# EAGLE library part IC_74HCT4067 (library dp_devices.v6)
74HCT4067 16-channel analog multiplexer/demultiplexer
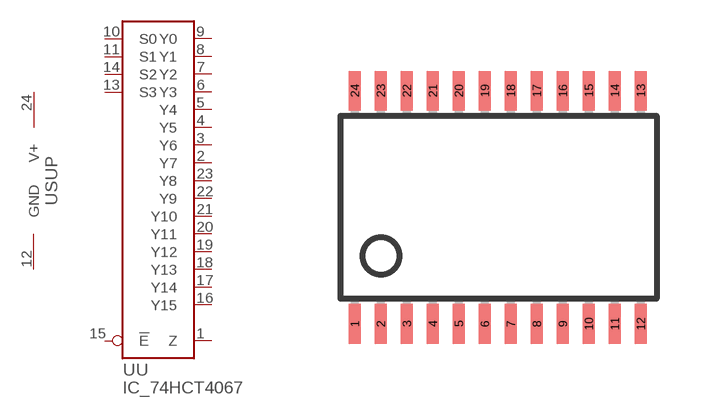
[diagram p179: symbol with the pads of TSSOP-24; footprint TSSOP-24]

Designator prefix U; gates U=74HCT4067 SUP=SUPPLY

## IC_74HCT4067  [TSSOP-24]
1  U:Z  in
2  U:Y7  in
3  U:Y6  in
4  U:Y5  in
5  U:Y4  in
6  U:Y3  in
7  U:Y2  in
8  U:Y1  in
9  U:Y0  in
10  U:S0  in
11  U:S1  in
12  SUP:GND  sup
13  U:S3  in
14  U:S2  in
15  U:!E  in
16  U:Y15  in
17  U:Y14  in
18  U:Y13  in
19  U:Y12  in
20  U:Y11  in
21  U:Y10  in
22  U:Y9  in
23  U:Y8  in
24  SUP:V+  sup

## Footprint TSSOP-24 (pad centres in mm)
Plastic Thin Shrink Small Outline package 24-pins
smd 0.305 x 0.991: 1 -3.59,-2.918; 2 -2.94,-2.918; 3 -2.29,-2.918; 4 -1.64,-2.918; 5 -0.99,-2.918; 6 -0.34,-2.918; 7 0.31,-2.918; 8 0.96,-2.918; 9 1.61,-2.918; 10 2.26,-2.918; 11 2.91,-2.918; 12 3.56,-2.918; 13 3.56,2.918; 14 2.91,2.918; 15 2.26,2.918; 16 1.61,2.918; 17 0.96,2.918; 18 0.31,2.918; 19 -0.34,2.918; 20 -0.99,2.918; 21 -1.64,2.918; 22 -2.29,2.918; 23 -2.94,2.918; 24 -3.59,2.918